# Altium integrated library VIETTIEN_2.IntLib: 110 symbols (part 4 of 5)

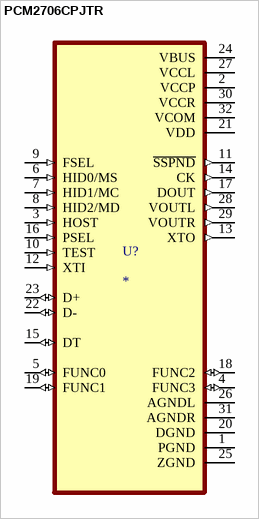
[diagram p69: symbol PCM2706CPJTR]

## PCM2706CPJTR
designator U?
MP: PCM2706CPJTR; Package: None; Price: None; Value: *; Availability: Unavailable
footprint QFP80P900X900X120-32N
pins: 1 PGND (power), 2 VCCP (power), 3 HOST (in), 4 FUNC3 (io), 5 FUNC0 (io), 6 HID0/MS (in), 7 HID1/MC (in), 8 HID2/MD (in), 9 FSEL (in), 10 TEST (in), 11 ~{SSPND} (out), 12 XTI (in), 13 XTO (out), 14 CK (out), 15 DT (io), 16 PSEL (in), 17 DOUT (out), 18 FUNC2 (io), 19 FUNC1 (io), 20 DGND (power), 21 VDD (power), 22 D- (io), 23 D+ (io), 24 VBUS (power), 25 ZGND (power), 26 AGNDL (power), 27 VCCL (power), 28 VOUTL (out), 29 VOUTR (out), 30 VCCR (power), 31 AGNDR (power), 32 VCOM (power)


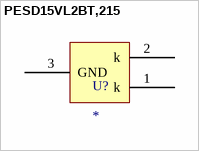
[diagram p70: symbol PESD15VL2BT,215]

## PESD15VL2BT,215
designator U?
44V Clamp 5A (8/20µs) Ipp Tvs Diode Surface Mount TO-236AB / PESD15VL2BT,215
footprint SOT95P280X145-5N
pins: 1 k, 2 k, 3 GND


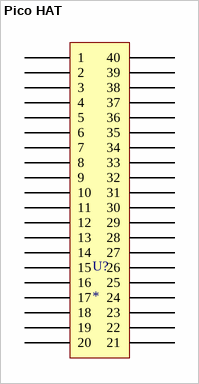
[diagram p71: symbol Pico HAT]

## Pico HAT
designator U?
footprint Pico_HAT
pins: 1, 2, 3, 4, 5, 6, 7, 8, 9, 10, 11, 12, 13, 14, 15, 16, 17, 18, 19, 20, 21, 22, 23, 24, 25, 26, 27, 28, 29, 30, 31, 32, 33, 34, 35, 36, 37, 38, 39, 40


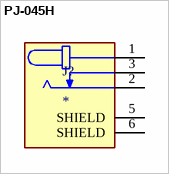
[diagram p72: symbol PJ-045H]

## PJ-045H
designator J?
1.65 x 4.5 mm, 5.0 A, Horizontal, Through Hole, Shielded, Dc Power Jack Connector; MPN: PJ-045H; MANUFACTURER: Same Sky; DATASHEET_URL: https://s3.amazonaws.com/snapeda/datasheet/PJ-045H_CUI_Devices.pdf; SOURCE_URL: https://www.snapeda.com/parts/PJ-045H/Same+Sky/view-part/; Value: *
footprint CUI_PJ-045H
pins: 1, 2, 3, 5 SHIELD, 6 SHIELD


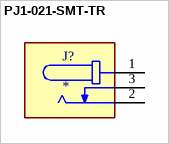
[diagram p73: symbol PJ1-021-SMT-TR]

## PJ1-021-SMT-TR
designator J?
1.65 x 5.15 mm, 5.0 A, Horizontal, Surface Mount (SMT), Dc Power Jack Connector; MF: Same Sky; MP: PJ1-021-SMT-TR; SnapEDA_Link: https://www.snapeda.com/parts/PJ1-021-SMT-TR/Same+Sky/view-part/?ref=snap; Package: None; Value: *; Check_prices: https://www.snapeda.com/parts/PJ1-021-SMT-TR/Same+Sky/view-part/?ref=eda
footprint CUI_PJ1-021-SMT-TR
pins: 1, 2, 3


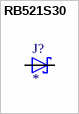
[diagram p74: symbol RB521S30]

## RB521S30
designator J?
Diode 30 V 200mA Surface Mount SOD-523F; MF: Taiwan Semiconductor; MP: RB521S-30; SnapEDA_Link: https://www.snapeda.com/parts/RB521S-30/taiwan/view-part/?ref=snap; Package: SOD-523F-2 Taiwan Semiconductor; Value: *; Check_prices: https://www.snapeda.com/parts/RB521S-30/taiwan/view-part/?ref=eda
footprint SOD523
pins: 1 K, 2 A


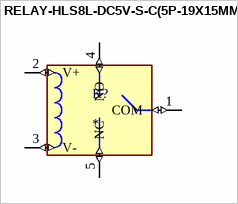
[diagram p75: symbol RELAY-HLS8L-DC5V-S-C(5P-19X15MM)]

## RELAY-HLS8L-DC5V-S-C(5P-19X15MM)
designator K?
DIP Power Relay 5V-7A;; MF: Helishun; MP: HLS8L-DC5V-S-C; SnapEDA_Link: https://www.snapeda.com/parts/HLS8L-DC5V-S-C/Helishun/view-part/?ref=snap; Package: None; Value: *; Check_prices: https://www.snapeda.com/parts/HLS8L-DC5V-S-C/Helishun/view-part/?ref=eda
footprint REY5-19.0X15.0X15.0MM
pins: 1 COM (io), 2 V+ (io), 3 V- (io), 4 NO (io), 5 NC (io)


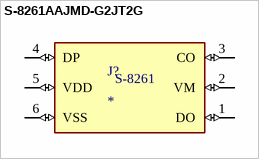
[diagram p76: symbol S-8261AAJMD-G2JT2G]

## S-8261AAJMD-G2JT2G
designator J?
Battery Battery Protection IC Lithium Ion/Polymer SOT-23-6; MP: S-8261AAJMD-G2JT2G; MF: ABLIC U.S.A.; Check_prices: https://www.snapeda.com/parts/S-8261AAJMD-G2JT2G/ABLIC+U.S.A.+Inc./view-part/?ref=eda; Value: *; Availability: In Stock; Price: None; Package: SOT-23-6 ABLIC U.S.A. Inc.; SnapEDA_Link: https://www.snapeda.com/parts/S-8261AAJMD-G2JT2G/ABLIC+U.S.A.+Inc./view-part/?ref=snap; Purchase-URL: https://pricing.snapeda.com/search/part/S-8261AAJMD-G2JT2G/?ref=eda
footprint SOT95P275X135-6
pins: 1 DO (io), 2 VM (io), 3 CO (io), 4 DP (io), 5 VDD (io), 6 VSS (io)
text: S-8261


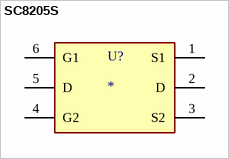
[diagram p77: symbol SC8205S]

## SC8205S
designator U?
SC8205S – Dual N-Channel Enhancement Mode Power MOSFET, SOT-23-6 Package.; MF: Texas Instruments; MP: SN6505ADBVR; SnapEDA_Link: https://www.snapeda.com/parts/SN6505ADBVR/Texas+Instruments/view-part/?ref=snap; Package: SOT-23-6 Texas Instruments; Value: *; Check_prices: https://www.snapeda.com/parts/SN6505ADBVR/Texas+Instruments/view-part/?ref=eda
footprint IC_SN6505ADBVR
pins: 1 S1 (power), 2 D, 3 S2, 4 G2 (power), 5 D, 6 G1


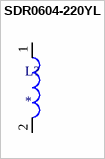
[diagram p78: symbol SDR0604-220YL]

## SDR0604-220YL
designator L?
Inductor Power Wirewound 120uH 10% 1KHz 22Q-Factor Ferrite 480mA 930mOhm DCR T/R; MP: SDR0604-220YL; Package: None; Price: None; Value: *; Availability: Unavailable
footprint INDP5858X480N
pins: 1, 2


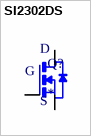
[diagram p79: symbol SI2302DS]

## SI2302DS
designator Q?
N-Channel 20V 2.5A (Tc) 830mW (Tc) Surface Mount TO-236AB (SOT23); MF: NXP Semiconductors; MP: SI2302DS; SnapEDA_Link: https://www.snapeda.com/parts/SI2302DS/NXP+Semiconductors/view-part/?ref=snap; Package: SC-59 NXP Semiconductors; Value: *; Check_prices: https://www.snapeda.com/parts/SI2302DS/NXP+Semiconductors/view-part/?ref=eda
footprint SOT23-3/TO-236AB
pins: 1 G, 2 S, 3 D


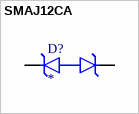
[diagram p80: symbol SMAJ12CA]

## SMAJ12CA
designator D?
19.9V Clamp 20.1A Ipp Tvs Diode Surface Mount SMAJ (DO-214AC); MF: AVX; MP: SMAJ12CA; SnapEDA_Link: https://www.snapeda.com/parts/SMAJ12CA/AVX/view-part/?ref=snap; Package: DO-214 AVX; Value: *; Check_prices: https://www.snapeda.com/parts/SMAJ12CA/AVX/view-part/?ref=eda
footprint DIOM5026X229N
pins: 1 K (io), 2 A (io)


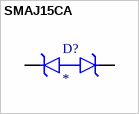
[diagram p81: symbol SMAJ15CA]

## SMAJ15CA
designator D?
SMAJ15CA, Bi-Directional TVS Diode, 400W, 2-Pin DO-214AC | Littelfuse SMAJ15CA
footprint DIOM4325X250N
pins: 1 (io), 2 (io)


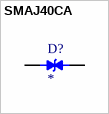
[diagram p82: symbol SMAJ40CA]

## SMAJ40CA
designator D?
Transient Voltage Suppressor, TVS, Transil SMAJ Series, Bidirectional, 40 V, DO-214AC, 2, 44.4 V; MF: STMicroelectronics; MP: SMAJ40CA-TR; SnapEDA_Link: https://www.snapeda.com/parts/SMAJ40CA-TR/STMicroelectronics/view-part/?ref=snap; Package: DO-214 STMicroelectronics; Value: *; Check_prices: https://www.snapeda.com/parts/SMAJ40CA-TR/STMicroelectronics/view-part/?ref=eda
footprint DIOM4325X250N
pins: 1, 2


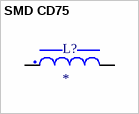
[diagram p83: symbol SMD CD75]

## SMD CD75
designator L?
SMD CD75 7.8x7.8x5; MF: {'manufacturer': u'W\xfcrth Elektronik'}; MP: 744775122; Package: None; Price: None; Value: *; Availability: Unavailable
footprint WE-PD2_7850
pins: 1, 2


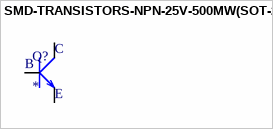
[diagram p84: symbol SMD-TRANSISTORS-NPN-25V-500MW(SOT-23)]

## SMD-TRANSISTORS-NPN-25V-500MW(SOT-23)
designator Q?
Bipolar (BJT) Transistor NPN 25 V 500 mA 150MHz 300 mW Surface Mount SOT-23; MF: UMW; MP: S8050; Purchase-URL: https://pricing.snapeda.com/search/part/S8050/?ref=eda; Check_prices: https://www.snapeda.com/parts/S8050/Umwelt+Sensor+Teknik/view-part/?ref=eda; SnapEDA_Link: https://www.snapeda.com/parts/S8050/Umwelt+Sensor+Teknik/view-part/?ref=snap; Price: None; Availability: In Stock; Package: None; Value: *
footprint SOT-23
pins: 1 B, 2 E, 3 C


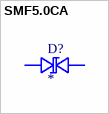
[diagram p85: symbol SMF5.0CA]

## SMF5.0CA
designator D?
9.2V Clamp 21.7A Ipp Tvs Diode Surface Mount SOD-123F; MF: Littelfuse Inc.; MP: SMF5.0CA; SnapEDA_Link: https://www.snapeda.com/parts/SMF5.0CA/Littelfuse/view-part/?ref=snap; Package: SOD-123F Littelfuse; Value: *; Check_prices: https://www.snapeda.com/parts/SMF5.0CA/Littelfuse/view-part/?ref=eda
footprint SOD-123FL
pins: P$1 1 (io), P$2 2 (io)


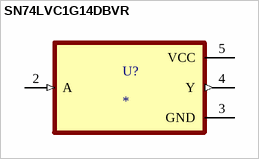
[diagram p86: symbol SN74LVC1G14DBVR]

## SN74LVC1G14DBVR
designator U?
Single 1.65-V to 5.5-V inverter with Schmitt-Trigger inputs; MF: Texas Instruments; MP: SN74LVC1G14DBVR; SnapEDA_Link: https://www.snapeda.com/parts/SN74LVC1G14DBVR/Texas+Instruments/view-part/?ref=snap; Package: SOT-23-5 Texas Instruments; Value: *; Check_prices: https://www.snapeda.com/parts/SN74LVC1G14DBVR/Texas+Instruments/view-part/?ref=eda
footprint SOT95P280X145-5N
pins: 2 A (in), 3 GND (power), 4 Y (out), 5 VCC (power)


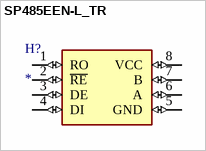
[diagram p87: symbol SP485EEN-L_TR]

## SP485EEN-L_TR
designator H?
SP485E Series 10Mbps 5V Enhanced Low EMI Half Duplex RS-485 Transceiver -NSOIC-8; MF: MaxLinear, Inc.; MP: SP485EEN-L/TR; SnapEDA_Link: https://www.snapeda.com/parts/SP485EEN-L/TR/MaxLinear/view-part/?ref=snap; Package: SOIC-8 Exar; Value: *; Check_prices: https://www.snapeda.com/parts/SP485EEN-L/TR/MaxLinear/view-part/?ref=eda
footprint SOIC127P600X175-8N
pins: 1 RO (io), 2 ~{RE} (io), 3 DE (io), 4 DI (io), 5 GND (io), 6 A (io), 7 B (io), 8 VCC (io)


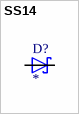
[diagram p88: symbol SS14]

## SS14
designator D?
Diode Schottky 40 V 1A Surface Mount DO-214AC (SMA); MF: onsemi; MP: SS14; SnapEDA_Link: https://www.snapeda.com/parts/SS14/Onsemi/view-part/?ref=snap; Package: SMA-2 ON Semiconductor; Value: *; Check_prices: https://www.snapeda.com/parts/SS14/Onsemi/view-part/?ref=eda
footprint DO-214AC
pins: A, K


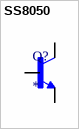
[diagram p89: symbol SS8050]

## SS8050
designator Q?
NPN Epitaxial Silicon Transistor; MF: ON Semiconductor / Fairchild; MP: SS8050; SnapEDA_Link: https://www.snapeda.com/parts/SS8050/Fairchild+Semiconductor/view-part/?ref=snap; Package: TO-92-3 ON Semiconductor; Value: *; Check_prices: https://www.snapeda.com/parts/SS8050/Fairchild+Semiconductor/view-part/?ref=eda
footprint SOT-23_BEC
pins: B, C, E


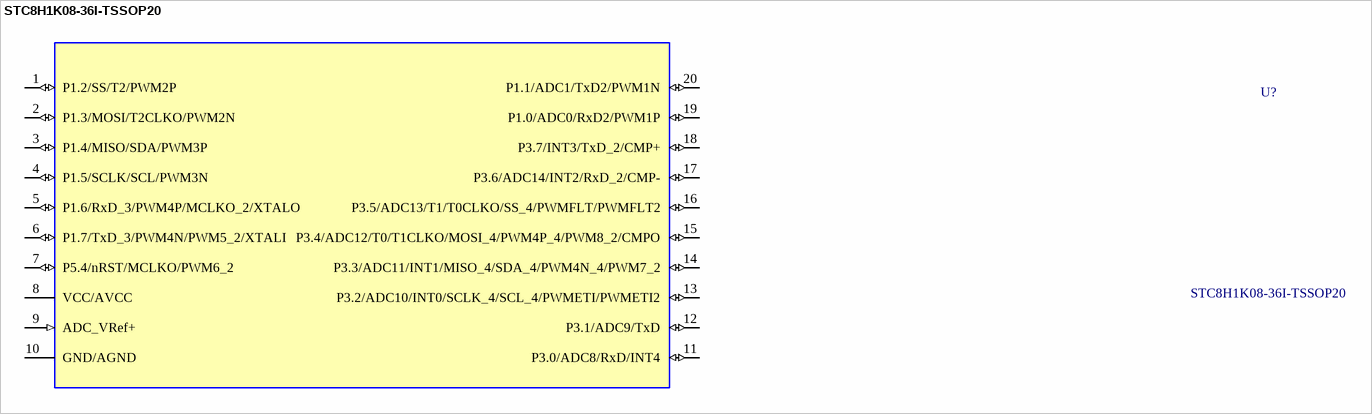
[diagram p90: symbol STC8H1K08-36I-TSSOP20]

## STC8H1K08-36I-TSSOP20
designator U?
Manufacturer: STC Micro; Value: STC8H1K08-36I-TSSOP20; MPN: STC8H1K08-36I-TSSOP20; LCSC Part #: C915673; Manufacturer Part Number: STC8H1K08-36I-TSSOP20
footprint TSSOP-20_4.4x6.5mm_P0.65mm
pins: 1 P1.2/SS/T2/PWM2P (io), 2 P1.3/MOSI/T2CLKO/PWM2N (io), 3 P1.4/MISO/SDA/PWM3P (io), 4 P1.5/SCLK/SCL/PWM3N (io), 5 P1.6/RxD_3/PWM4P/MCLKO_2/XTALO (io), 6 P1.7/TxD_3/PWM4N/PWM5_2/XTALI (io), 7 P5.4/nRST/MCLKO/PWM6_2 (io), 8 VCC/AVCC (power), 9 ADC_VRef+ (in), 10 GND/AGND (power), 11 P3.0/ADC8/RxD/INT4 (io), 12 P3.1/ADC9/TxD (io), 13 P3.2/ADC10/INT0/SCLK_4/SCL_4/PWMETI/PWMETI2 (io), 14 P3.3/ADC11/INT1/MISO_4/SDA_4/PWM4N_4/PWM7_2 (io), 15 P3.4/ADC12/T0/T1CLKO/MOSI_4/PWM4P_4/PWM8_2/CMPO (io), 16 P3.5/ADC13/T1/T0CLKO/SS_4/PWMFLT/PWMFLT2 (io), 17 P3.6/ADC14/INT2/RxD_2/CMP- (io), 18 P3.7/INT3/TxD_2/CMP+ (io), 19 P1.0/ADC0/RxD2/PWM1P (io), 20 P1.1/ADC1/TxD2/PWM1N (io)


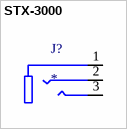
[diagram p91: symbol STX-3000]

## STX-3000
designator J?
3.50mm (0.141, 1/8, Mini Plug) - Headphone Phone Jack Stereo (3 Conductor, TRS) Connector Kinked Pin; MF: Kycon; SnapEDA_Link: https://www.snapeda.com/parts/STX-3000/Kycon/view-part/?ref=snap; Package: None; Value: *; MP: STX-3000; Check_prices: https://www.snapeda.com/parts/STX-3000/Kycon/view-part/?ref=eda
footprint KYCON_STX-3000
pins: 1, 2, 3
